# Altium footprint library ACS712-05B.PcbLib: 1 footprints
Each footprint in its own frame and in the unit in brackets; x right, y up, seen from the top. Pads: shape width x height; smd on the part's side, far side on the other; paste and mask are expansions set on the pad; w line width, h text height; cw(c..) or ccw(c..) is an arc to the next point about the centre after c.
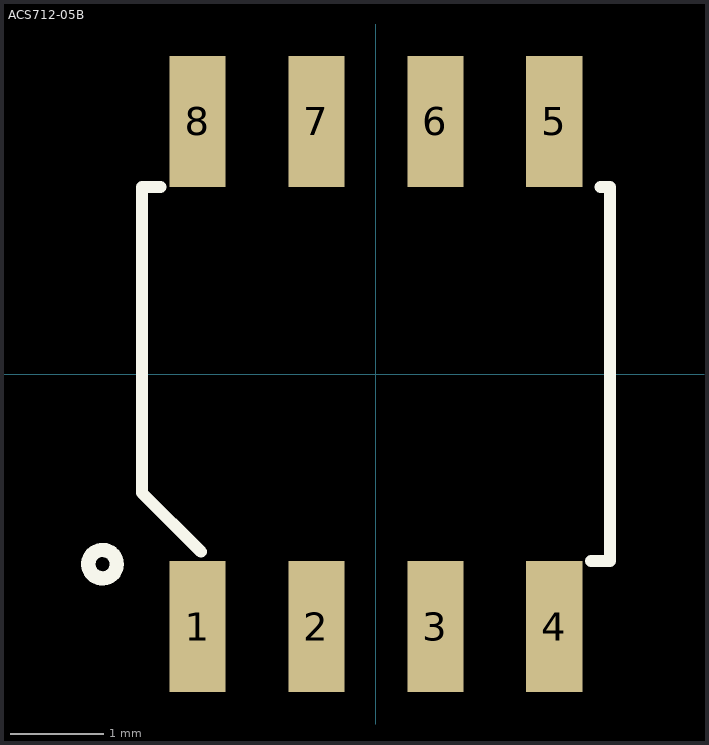
[diagram p0: the footprint, top view; thin cyan lines are the x and y axes]

## ACS712-05B [mm] "SOIC8-1.27-5X4MM"
pads (8):
  rect 0.6x1.4 smd: 1(-1.905,-2.7) 2(-0.635,-2.7) 3(0.635,-2.7) 4(1.905,-2.7) 5(1.905,2.7) 6(0.635,2.7) 7(-0.635,2.7) 8(-1.905,2.7)
Top Overlay:
  circle w0.152: c-2.921,-2.032 r0.152
  lines w0.127: -2.3,2 -2.5,2 -2.5,-1.269 -1.869,-1.9 ; 2.3,-2 2.5,-2 2.5,2 2.4,2
3D body "ACS712-05B.STEP": height 1.75, standoff 0, extent -2.45,-3 2.45,3